# Altium footprint library FootPrintLib_10.PcbLib: 270 footprints (part 8 of 17)
Each footprint in its own frame and in the unit in brackets; x right, y up, seen from the top. Pads: shape width x height; smd on the part's side, far side on the other; paste and mask are expansions set on the pad; w line width, h text height; cw(c..) or ccw(c..) is an arc to the next point about the centre after c.
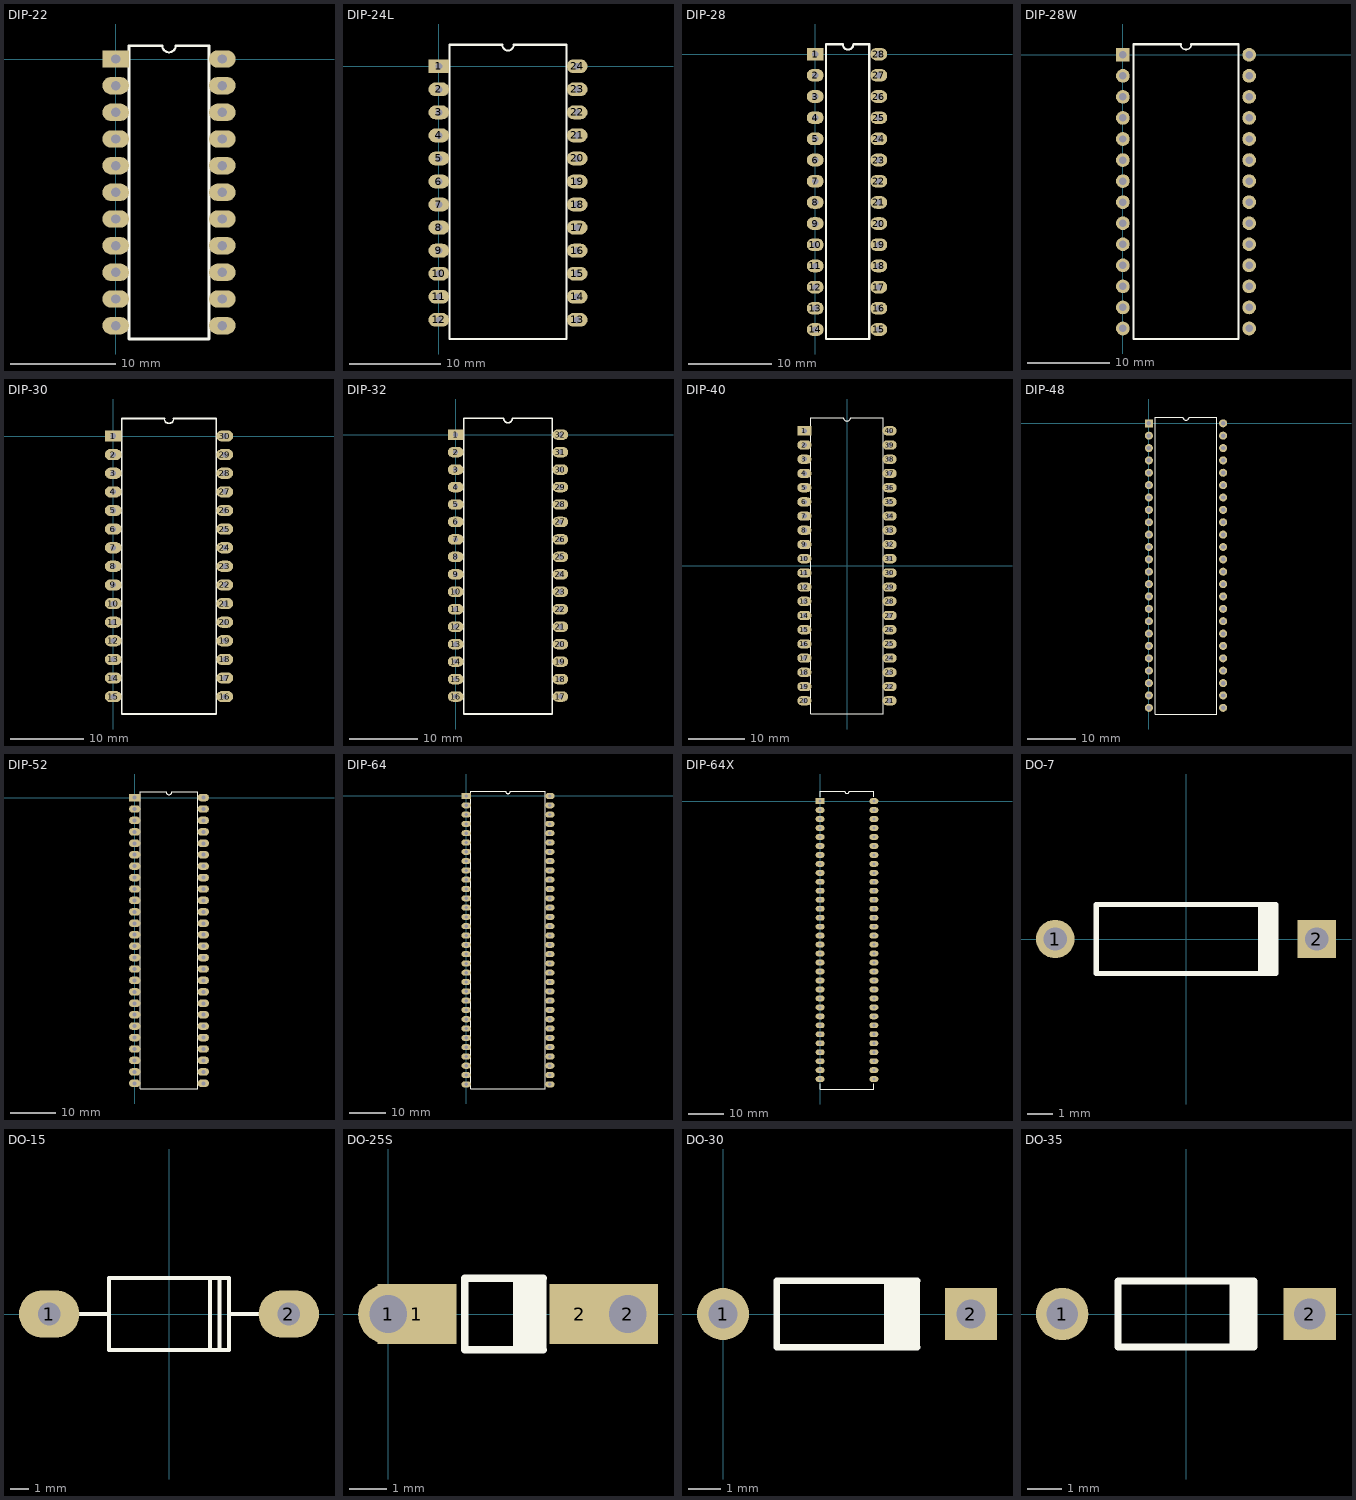
[diagram p7: the footprints below, top view; thin cyan lines are the x and y axes]

## DIP-22 [mm]
pads (22):
  oval 2.54x1.65 hole 0.889: ""(0,-25.4) ""(0,-22.86) ""(0,-20.32) ""(0,-17.78) ""(0,-15.24) ""(0,-12.7) ""(0,-10.16) ""(0,-7.62) ""(0,-5.08) ""(0,-2.54) ""(10.16,-25.4) ""(10.16,-22.86) ""(10.16,-20.32) ""(10.16,-17.78) ""(10.16,-15.24) ""(10.16,-12.7) ""(10.16,-10.16) ""(10.16,-7.62) ""(10.16,-5.08) ""(10.16,-2.54) ""(10.16,0)
  rect 2.54x1.65 hole 0.889: ""(0,0)
Top Overlay:
  lines w0.2: 4.445,1.27 ccw(c5.08,1.27) 5.715,1.27
  lines w0.25: 4.445,1.27 1.27,1.27 1.27,-26.67 8.89,-26.67 8.89,1.27 5.715,1.27

## DIP-24L [mil]
pads (24):
  rect 90x60 hole 30: 1(0,0)
  oval 90x60 hole 30: 2(0,-100) 3(0,-200) 4(0,-300) 5(0,-400) 6(0,-500) 7(0,-600) 8(0,-700) 9(0,-800) 10(0,-900) 11(0,-1000) 12(0,-1100) 13(600,-1100) 14(600,-1000) 15(600,-900) 16(600,-800) 17(600,-700) 18(600,-600) 19(600,-500) 20(600,-400) 21(600,-300) 22(600,-200) 23(600,-100) 24(600,0)
Top Overlay:
  lines w7.87: 275,93.31 ccw(c300,93.31) 325,93.31
  lines w10: 275,93.31 46.06,93.31 46.06,-1183.31 553.94,-1183.31 553.94,93.31 325,93.31

## DIP-28 [mil]
pads (28):
  rect 80x60 hole 30: 1(0,0)
  oval 80x60 hole 30: 2(0,-100) 3(0,-200) 4(0,-300) 5(0,-400) 6(0,-500) 7(0,-600) 8(0,-700) 9(0,-800) 10(0,-900) 11(0,-1000) 12(0,-1100) 13(0,-1200) 14(0,-1300) 15(300,-1300) 16(300,-1200) 17(300,-1100) 18(300,-1000) 19(300,-900) 20(300,-800) 21(300,-700) 22(300,-600) 23(300,-500) 24(300,-400) 25(300,-300) 26(300,-200) 27(300,-100) 28(300,0)
Top Overlay:
  lines w10: 50,45 50,-1345 255,-1345 255,46.54 180,46.54 cw(c155,46.53) 130,46.53 50.67,46.54
3D body "DIP28-300.step": height 210, standoff -88.03, extent -4.92,-1357.32 304.92,60

## DIP-28W [mm]
pads (28):
  round 1.65 hole 0.9: ""(0,-33.02) ""(0,-30.48) ""(0,-27.94) ""(0,-25.4) ""(0,-22.86) ""(0,-20.32) ""(0,-17.78) ""(0,-15.24) ""(0,-12.7) ""(0,-10.16) ""(0,-7.62) ""(0,-5.08) ""(0,-2.54) ""(15.24,-33.02) ""(15.24,-30.48) ""(15.24,-27.94) ""(15.24,-25.4) ""(15.24,-22.86) ""(15.24,-20.32) ""(15.24,-17.78) ""(15.24,-15.24) ""(15.24,-12.7) ""(15.24,-10.16) ""(15.24,-7.62) ""(15.24,-5.08) ""(15.24,-2.54) ""(15.24,0)
  rect 1.65x1.65 hole 0.9: ""(0,0)
Top Overlay:
  lines w0.2: 6.985,1.27 ccw(c7.62,1.27) 8.255,1.27
  lines w0.25: 6.985,1.27 1.27,1.27 1.27,-34.29 13.97,-34.29 13.97,1.27 8.255,1.27

## DIP-30 [mil]
pads (30):
  rect 90x60 hole 30: 1(0,0)
  oval 90x60 hole 30: 2(0,-100) 3(0,-200) 4(0,-300) 5(0,-400) 6(0,-500) 7(0,-600) 8(0,-700) 9(0,-800) 10(0,-900) 11(0,-1000) 12(0,-1100) 13(0,-1200) 14(0,-1300) 15(0,-1400) 16(600,-1400) 17(600,-1300) 18(600,-1200) 19(600,-1100) 20(600,-1000) 21(600,-900) 22(600,-800) 23(600,-700) 24(600,-600) 25(600,-500) 26(600,-400) 27(600,-300) 28(600,-200) 29(600,-100) 30(600,0)
Top Overlay:
  lines w7.87: 275,93.31 ccw(c300,93.31) 325,93.31
  lines w10: 275,93.31 46.06,93.31 46.06,-1493.31 553.94,-1493.31 553.94,93.31 325,93.31

## DIP-32 [mil]
pads (32):
  rect 90x60 hole 30: 1(0,0)
  oval 90x60 hole 30: 2(0,-100) 3(0,-200) 4(0,-300) 5(0,-400) 6(0,-500) 7(0,-600) 8(0,-700) 9(0,-800) 10(0,-900) 11(0,-1000) 12(0,-1100) 13(0,-1200) 14(0,-1300) 15(0,-1400) 16(0,-1500) 17(600,-1500) 18(600,-1400) 19(600,-1300) 20(600,-1200) 21(600,-1100) 22(600,-1000) 23(600,-900) 24(600,-800) 25(600,-700) 26(600,-600) 27(600,-500) 28(600,-400) 29(600,-300) 30(600,-200) 31(600,-100) 32(600,0)
Top Overlay:
  lines w7.87: 275,93.31 ccw(c300,93.31) 325,93.31
  lines w10: 275,93.31 46.06,93.31 46.06,-1600 553.94,-1600 553.94,93.31 325,93.31

## DIP-40 [mm]
pads (40):
  rect 2.54x1.651 hole 0.9: 1(-7.62,24.13)
  oval 2.54x1.651 hole 0.9: 2(-7.62,21.59) 3(-7.62,19.05) 4(-7.62,16.51) 5(-7.62,13.97) 6(-7.62,11.43) 7(-7.62,8.89) 8(-7.62,6.35) 9(-7.62,3.81) 10(-7.62,1.27) 11(-7.62,-1.27) 12(-7.62,-3.81) 13(-7.62,-6.35) 14(-7.62,-8.89) 15(-7.62,-11.43) 16(-7.62,-13.97) 17(-7.62,-16.51) 18(-7.62,-19.05) 19(-7.62,-21.59) 20(-7.62,-24.13) 21(7.62,-24.13) 22(7.62,-21.59) 23(7.62,-19.05) 24(7.62,-16.51) 25(7.62,-13.97) 26(7.62,-11.43) 27(7.62,-8.89) 28(7.62,-6.35) 29(7.62,-3.81) 30(7.62,-1.27) 31(7.62,1.27) 32(7.62,3.81) 33(7.62,6.35) 34(7.62,8.89) 35(7.62,11.43) 36(7.62,13.97) 37(7.62,16.51) 38(7.62,19.05) 39(7.62,21.59) 40(7.62,24.13)
Top Overlay:
  lines w0.2: -6.45,-26.5 6.45,-26.5 6.45,26.5 0.635,26.5 cw(c0,26.5) -0.635,26.5 -6.45,26.5 -6.45,-26.5
3D body "SW3dPS-DIP40-600.step": height 5.7, standoff -2.58, extent -7.745,-26.225 7.745,26.225

## DIP-48 [mm]
pads (48):
  round 1.65 hole 0.9: ""(0,-58.42) ""(0,-55.88) ""(0,-53.34) ""(0,-50.8) ""(0,-48.26) ""(0,-45.72) ""(0,-43.18) ""(0,-40.64) ""(0,-38.1) ""(0,-35.56) ""(0,-33.02) ""(0,-30.48) ""(0,-27.94) ""(0,-25.4) ""(0,-22.86) ""(0,-20.32) ""(0,-17.78) ""(0,-15.24) ""(0,-12.7) ""(0,-10.16) ""(0,-7.62) ""(0,-5.08) ""(0,-2.54) ""(15.24,-58.42) ""(15.24,-55.88) ""(15.24,-53.34) ""(15.24,-50.8) ""(15.24,-48.26) ""(15.24,-45.72) ""(15.24,-43.18) ""(15.24,-40.64) ""(15.24,-38.1) ""(15.24,-35.56) ""(15.24,-33.02) ""(15.24,-30.48) ""(15.24,-27.94) ""(15.24,-25.4) ""(15.24,-22.86) ""(15.24,-20.32) ""(15.24,-17.78) ""(15.24,-15.24) ""(15.24,-12.7) ""(15.24,-10.16) ""(15.24,-7.62) ""(15.24,-5.08) ""(15.24,-2.54) ""(15.24,0)
  rect 1.65x1.65 hole 0.9: ""(0,0)
Top Overlay:
  lines w0.2: 6.985,1.27 ccw(c7.62,1.27) 8.255,1.27
  lines w0.25: 6.985,1.27 1.27,1.27 1.27,-59.69 13.97,-59.69 13.97,1.27 8.255,1.27

## DIP-52 [mm]
pads (52):
  oval 2.54x1.65 hole 0.889: ""(0,-63.5) ""(0,-60.96) ""(0,-58.42) ""(0,-55.88) ""(0,-53.34) ""(0,-50.8) ""(0,-48.26) ""(0,-45.72) ""(0,-43.18) ""(0,-40.64) ""(0,-38.1) ""(0,-35.56) ""(0,-33.02) ""(0,-30.48) ""(0,-27.94) ""(0,-25.4) ""(0,-22.86) ""(0,-20.32) ""(0,-17.78) ""(0,-15.24) ""(0,-12.7) ""(0,-10.16) ""(0,-7.62) ""(0,-5.08) ""(0,-2.54) ""(15.24,-63.5) ""(15.24,-60.96) ""(15.24,-58.42) ""(15.24,-55.88) ""(15.24,-53.34) ""(15.24,-50.8) ""(15.24,-48.26) ""(15.24,-45.72) ""(15.24,-43.18) ""(15.24,-40.64) ""(15.24,-38.1) ""(15.24,-35.56) ""(15.24,-33.02) ""(15.24,-30.48) ""(15.24,-27.94) ""(15.24,-25.4) ""(15.24,-22.86) ""(15.24,-20.32) ""(15.24,-17.78) ""(15.24,-15.24) ""(15.24,-12.7) ""(15.24,-10.16) ""(15.24,-7.62) ""(15.24,-5.08) ""(15.24,-2.54) ""(15.24,0)
  rect 2.54x1.65 hole 0.889: ""(0,0)
Top Overlay:
  lines w0.2: 6.985,1.27 ccw(c7.62,1.27) 8.255,1.27
  lines w0.25: 6.985,1.27 1.27,1.27 1.27,-64.77 13.97,-64.77 13.97,1.27 8.255,1.27

## DIP-64 [mm]
pads (64):
  oval 2.54x1.65 hole 0.889: ""(0,-78.74) ""(0,-76.2) ""(0,-73.66) ""(0,-71.12) ""(0,-68.58) ""(0,-66.04) ""(0,-63.5) ""(0,-60.96) ""(0,-58.42) ""(0,-55.88) ""(0,-53.34) ""(0,-50.8) ""(0,-48.26) ""(0,-45.72) ""(0,-43.18) ""(0,-40.64) ""(0,-38.1) ""(0,-35.56) ""(0,-33.02) ""(0,-30.48) ""(0,-27.94) ""(0,-25.4) ""(0,-22.86) ""(0,-20.32) ""(0,-17.78) ""(0,-15.24) ""(0,-12.7) ""(0,-10.16) ""(0,-7.62) ""(0,-5.08) ""(0,-2.54) ""(22.86,-78.74) ""(22.86,-76.2) ""(22.86,-73.66) ""(22.86,-71.12) ""(22.86,-68.58) ""(22.86,-66.04) ""(22.86,-63.5) ""(22.86,-60.96) ""(22.86,-58.42) ""(22.86,-55.88) ""(22.86,-53.34) ""(22.86,-50.8) ""(22.86,-48.26) ""(22.86,-45.72) ""(22.86,-43.18) ""(22.86,-40.64) ""(22.86,-38.1) ""(22.86,-35.56) ""(22.86,-33.02) ""(22.86,-30.48) ""(22.86,-27.94) ""(22.86,-25.4) ""(22.86,-22.86) ""(22.86,-20.32) ""(22.86,-17.78) ""(22.86,-15.24) ""(22.86,-12.7) ""(22.86,-10.16) ""(22.86,-7.62) ""(22.86,-5.08) ""(22.86,-2.54) ""(22.86,0)
  rect 2.54x1.65 hole 0.889: ""(0,0)
Top Overlay:
  lines w0.2: 10.795,1.27 ccw(c11.43,1.27) 12.065,1.27
  lines w0.25: 10.795,1.27 1.27,1.27 1.27,-80.01 21.59,-80.01 21.59,1.27 12.065,1.27

## DIP-64X [mm]
pads (64):
  oval 2.54x1.65 hole 0.889: ""(0,-78.74) ""(0,-76.2) ""(0,-73.66) ""(0,-71.12) ""(0,-68.58) ""(0,-66.04) ""(0,-63.5) ""(0,-60.96) ""(0,-58.42) ""(0,-55.88) ""(0,-53.34) ""(0,-50.8) ""(0,-48.26) ""(0,-45.72) ""(0,-43.18) ""(0,-40.64) ""(0,-38.1) ""(0,-35.56) ""(0,-33.02) ""(0,-30.48) ""(0,-27.94) ""(0,-25.4) ""(0,-22.86) ""(0,-20.32) ""(0,-17.78) ""(0,-15.24) ""(0,-12.7) ""(0,-10.16) ""(0,-7.62) ""(0,-5.08) ""(0,-2.54) ""(15.24,-78.74) ""(15.24,-76.2) ""(15.24,-73.66) ""(15.24,-71.12) ""(15.24,-68.58) ""(15.24,-66.04) ""(15.24,-63.5) ""(15.24,-60.96) ""(15.24,-58.42) ""(15.24,-55.88) ""(15.24,-53.34) ""(15.24,-50.8) ""(15.24,-48.26) ""(15.24,-45.72) ""(15.24,-43.18) ""(15.24,-40.64) ""(15.24,-38.1) ""(15.24,-35.56) ""(15.24,-33.02) ""(15.24,-30.48) ""(15.24,-27.94) ""(15.24,-25.4) ""(15.24,-22.86) ""(15.24,-20.32) ""(15.24,-17.78) ""(15.24,-15.24) ""(15.24,-12.7) ""(15.24,-10.16) ""(15.24,-7.62) ""(15.24,-5.08) ""(15.24,-2.54) ""(15.24,0)
  rect 2.54x1.65 hole 0.889: ""(0,0)
Top Overlay:
  lines w0.2: 6.985,2.8 ccw(c7.62,2.8) 8.255,2.8
  lines w0.25: 0,-80.002 0,-81.54 15.24,-81.54 15.24,-80.002 ; 0,1.262 0,2.8 6.985,2.8 ; 8.255,2.8 15.24,2.8 15.24,1.262

## DO-7 [mm] "Diode, Axial; Body 7 x 2.7 mm (LxDia. max), Lead Dia. 0.53 mm (max)"
height 2.7
pads (2):
  round 1.5 hole 0.9: 1(-5.1,0)
  rect 1.5x1.5 hole 0.9: 2(5.1,0)
Top Overlay:
  rectangle: 2.8,-1.35 3.6,1.35
  lines w0.2: 3.5,-1.35 -3.5,-1.35 -3.5,1.35 3.5,1.35

## DO-15 [mm]
height 4
pads (2):
  oval 3.2x2.5 hole 1.2: 1(-6.35,0) 2(6.35,0)
Top Overlay:
  lines w0.2: -6,0 -3.175,0 ; 2.175,-1.905 2.175,1.905 ; 2.675,-1.905 2.675,1.905 ; 3.175,0 6,0 ; -3.175,-1.905 -3.175,1.905 3.175,1.905 3.175,-1.905 -3.175,-1.905
3D body "User Library-DO-15-1 (1).step": height 3.38, standoff -3.22, extent -6.75,-1.524 6.75,1.676

## DO-25S [mm] "Diode, Axial; Body 3.8 x 1.9 mm (LxDia. max), Lead Dia. 0.53 mm (max)"
height 1.9
pads (4):
  round 1.6 hole 1: 1(0,0)
  rect 2.1x1.6 smd: 1(0.762,0)
  rect 1.6x1.6 smd: 2(5.08,0)
  rect 1.6x1.6 hole 1: 2(6.35,0)
Top Overlay:
  rectangle: 3.302,-0.95 4.102,0.95
  lines w0.178: 4.102,-0.95 4.102,0.95
  lines w0.2: 4.102,-0.95 2.032,-0.95 2.032,0.95 4.102,0.95

## DO-30 [mm] "Diode, Axial; Body 3.8 x 1.9 mm (LxDia. max), Lead Dia. 0.53 mm (max)"
height 1.9
pads (2):
  round 1.6 hole 0.9: 1(0,0)
  rect 1.6x1.6 hole 0.9: 2(7.62,0)
Top Overlay:
  rectangle: 4.953,-1.016 5.969,1.016
  lines w0.178: 5.969,-1.016 5.969,1.016
  lines w0.2: 5.969,-1.016 1.651,-1.016 1.651,1.016 5.969,1.016

## DO-35 [mm] "Diode, Axial; Body 3.8 x 1.9 mm (LxDia. max), Lead Dia. 0.53 mm (max)"
height 1.9
pads (2):
  round 1.5 hole 0.9: 1(-3.55,0)
  rect 1.5x1.5 hole 0.9: 2(3.55,0)
Top Overlay:
  rectangle: 1.25,-0.95 2.05,0.95
  lines w0.2: 1.95,-0.95 -1.95,-0.95 -1.95,0.95 1.95,0.95